# Altium footprint library PCB_Libraries.PcbLib: 49 footprints (part 1 of 4)
Each footprint in its own frame and in the unit in brackets; x right, y up, seen from the top. Pads: shape width x height; smd on the part's side, far side on the other; paste and mask are expansions set on the pad; w line width, h text height; cw(c..) or ccw(c..) is an arc to the next point about the centre after c.
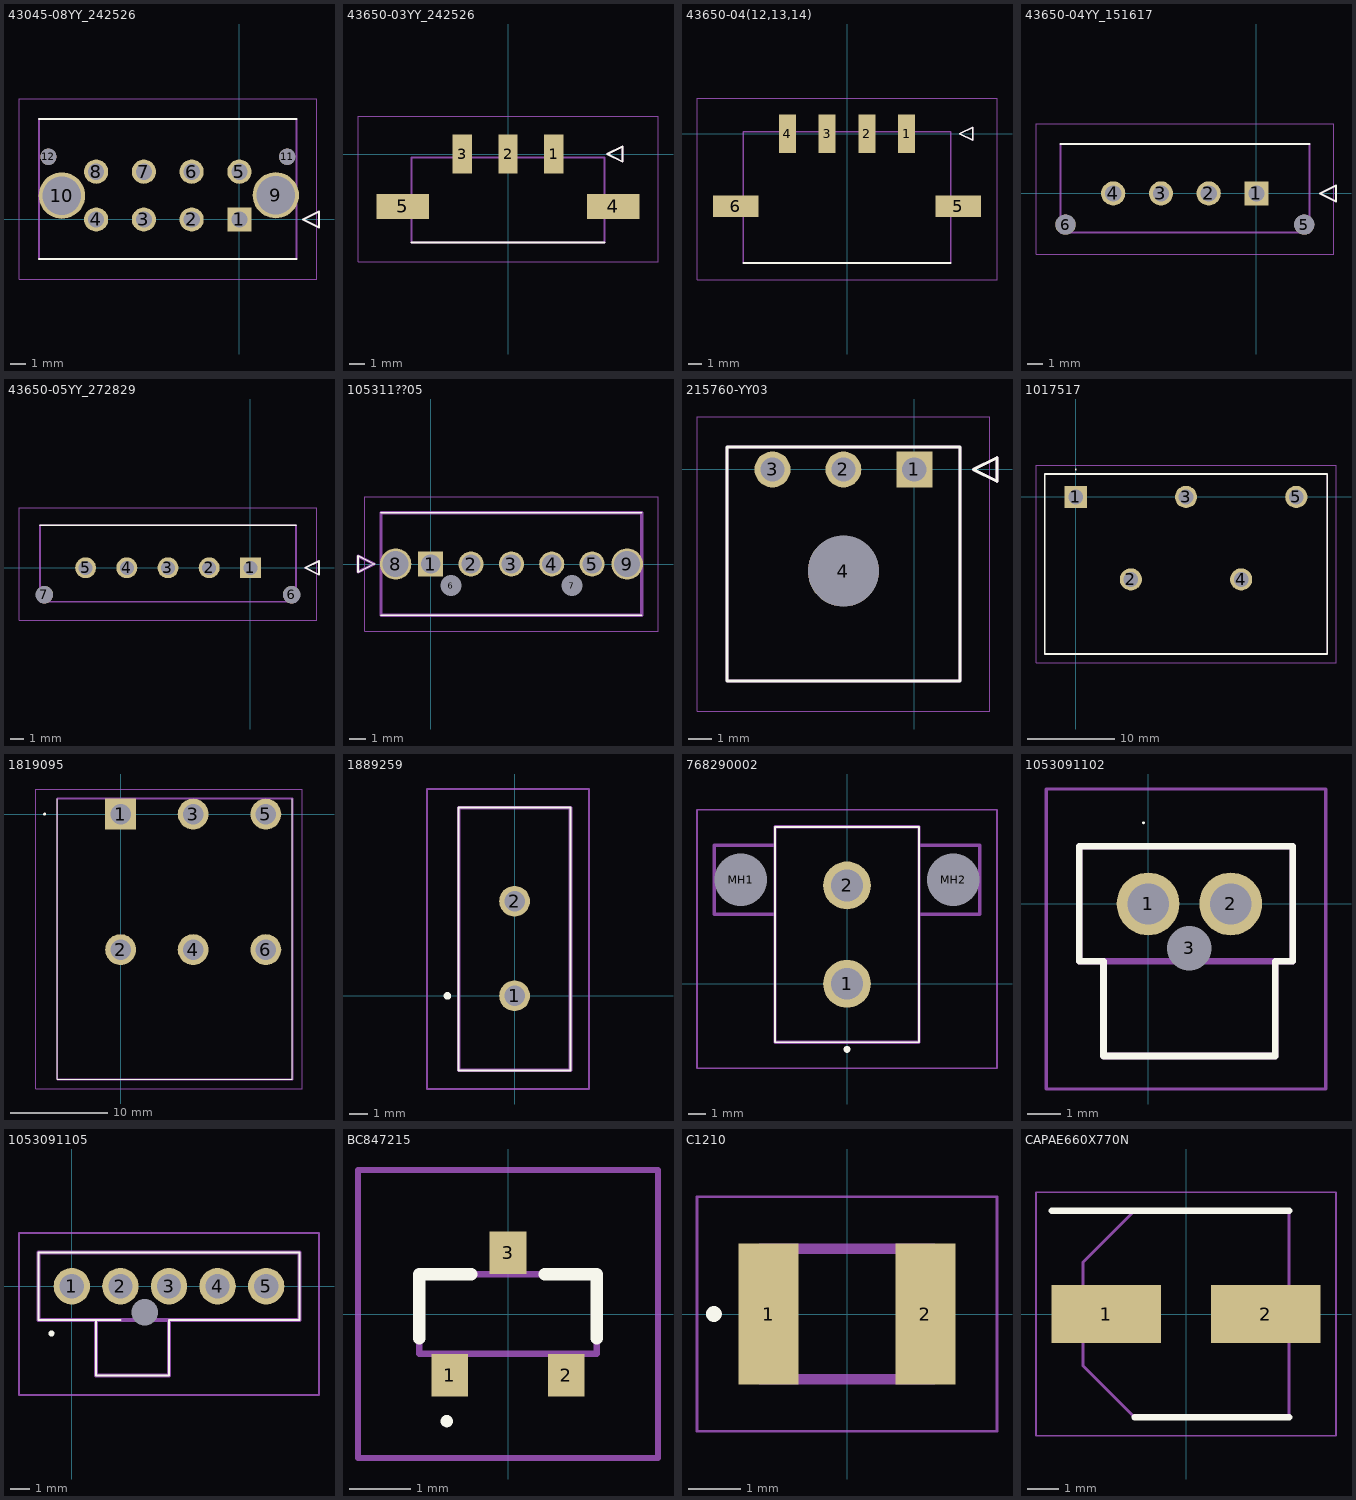
[diagram p0: the footprints below, top view; thin cyan lines are the x and y axes]

## 43045-08YY_242526 [mm]
pads (12):
  rect 1.52x1.52 hole 1.02: 1(0,0)
  round 1.52 hole 1.02: 2(-3,0) 3(-6,0) 4(-9,0) 5(0,3) 6(-3,3) 7(-6,3) 8(-9,3)
  round 2.91 hole 2.41: 9(2.286,1.524) 10(-11.15,1.5)
  round 1.02 hole 1.02 unplated: 11(3,3.94) 12(-12,3.94)
Top Overlay:
  lines w0.127: -12.575,-2.47 3.575,-2.47 ; -12.575,6.3 3.575,6.3 ; 4,0 5,0.5 5,-0.5 4,0
Mechanical 13:
  lines w0.127: -12.575,-2.47 -12.575,6.3 3.575,6.3 3.575,-2.47 -12.575,-2.47 ; 4,0 5,0.5 5,-0.5 4,0
Mechanical 15:
  lines w0.05: -13.845,-3.74 -13.845,7.57 4.845,7.57 4.845,-3.74 -13.845,-3.74
3D body "43045-0825.stp": height 9.78, standoff -3.3, extent -12.585,-2.48 3.565,6.29

## 43650-03YY_242526 [mm]
pads (5):
  rect 1.27x2.54 smd: 1(3,0) 2(0,0) 3(-3,0)
  rect 3.43x1.65 smd: 4(6.885,-3.42) 5(-6.885,-3.42)
Top Overlay:
  lines w0.127: -6.325,-5.785 6.325,-5.785 ; 6.5,0 7.5,-0.5 7.5,0.5 6.5,0
Mechanical 13:
  lines w0.127: -6.325,-5.785 6.325,-5.785 6.325,-0.215 -6.325,-0.215 -6.325,-5.785 ; 6.5,0 7.5,-0.5 7.5,0.5 6.5,0
Mechanical 15:
  lines w0.05: -9.819,-7.055 9.819,-7.055 9.819,2.489 -9.819,2.489 -9.819,-7.055
3D body "43650-0325.stp": height 9.93, standoff 0, extent -8.325,-5.85 8.325,0.718

## 43650-04(12,13,14) [mm]
pads (6):
  rect 1.27x2.92 smd: 1(4.5,0) 2(1.5,0) 3(-1.5,0) 4(-4.5,0)
  rect 3.43x1.65 smd: 5(8.385,-5.47) 6(-8.385,-5.47)
Top Overlay:
  lines w0.127: -7.825,-9.75 7.825,-9.75 ; 8.5,0 9.5,0.5 9.5,-0.5 8.5,0
Mechanical 13:
  lines w0.127: -7.825,-9.75 -7.825,0.15 7.825,0.15 7.825,-9.75 -7.825,-9.75 ; 8.5,0 9.5,0.5 9.5,-0.5 8.5,0
Mechanical 15:
  lines w0.05: -11.319,-11.02 -11.319,2.679 11.319,2.679 11.319,-11.02 -11.319,-11.02
3D body "43650-0414.stp": height 5.71, standoff 0.04, extent -9.825,-10.04 9.825,0.698

## 43650-04YY_151617 [mm]
pads (6):
  rect 1.52x1.52 hole 1.02: 1(0,0)
  round 1.52 hole 1.02: 2(-3,0) 3(-6,0) 4(-9,0)
  round 1.27 hole 1.27 unplated: 5(3,-1.96) 6(-12,-1.96)
Top Overlay:
  lines w0.127: -12.325,3.1 3.325,3.1 ; 4,0 5,0.5 5,-0.5 4,0
Mechanical 13:
  lines w0.127: -12.325,-2.47 -12.325,3.1 3.325,3.1 3.325,-2.47 -12.325,-2.47 ; 4,0 5,0.5 5,-0.5 4,0
Mechanical 15:
  lines w0.05: -13.854,-3.814 -13.854,4.37 4.854,4.37 4.854,-3.814 -13.854,-3.814
3D body "43650-0417.stp": height 9.77, standoff -3.31, extent -12.215,-2.46 3.435,3.145

## 43650-05YY_272829 [mm]
pads (7):
  rect 1.52x1.52 hole 1.02: 1(0,0)
  round 1.52 hole 1.02: 2(-3,0) 3(-6,0) 4(-9,0) 5(-12,0)
  round 1.27 hole 1.27 unplated: 6(3,-1.96) 7(-15,-1.96)
Top Overlay:
  lines w0.127: -15.325,3.1 3.325,3.1 ; 4,0 5,0.5 5,-0.5 4,0
Mechanical 13:
  lines w0.127: -15.325,-2.47 -15.325,3.1 3.325,3.1 3.325,-2.47 -15.325,-2.47 ; 4,0 5,0.5 5,-0.5 4,0
Mechanical 15:
  lines w0.05: -16.854,-3.814 -16.854,4.37 4.854,4.37 4.854,-3.814 -16.854,-3.814
3D body "43650-0528.stp": height 9.83, standoff -3.25, extent -15.26,-2.39 3.38,3.215

## 105311??05 [mm]
pads (9):
  rect 1.55x1.55 hole 1.2: 1(0,0)
  round 1.55 hole 1.2: 2(2.5,0) 3(5,0) 4(7.5,0) 5(10,0)
  round 0.65 hole 1.3 unplated: 6(1.25,-1.34) 7(8.75,-1.34)
  round 1.95 hole 1.6: 8(-2.17,0) 9(12.17,0)
Top Overlay:
  lines w0.1: -3.08,-3.17 13.08,-3.17 ; -3.08,3.17 13.08,3.17 ; -4.5,-0.5 -3.5,0 -4.5,0.5 -4.5,-0.5
Mechanical 13:
  lines w0.2: -4.5,-0.5 -3.5,0 -4.5,0.5 -4.5,-0.5 ; -3.08,-3.17 -3.08,3.17 13.08,3.17 13.08,-3.17 -3.08,-3.17
Mechanical 15:
  lines w0.05: -4.08,-4.17 -4.08,4.17 14.08,4.17 14.08,-4.17 -4.08,-4.17
3D body "1053111105.stp": height 10.6, standoff -3.11, extent -3.15,-1.66 13.01,4.68

## 215760-YY03 [mm]
pads (4):
  rect 1.52x1.52 hole 1.02: 1(0,0)
  round 1.52 hole 1.02: 2(-3,0) 3(-6,0)
  round 3 hole 3 unplated: 4(-3,-4.3)
Top Overlay:
  lines w0.127: -7.925,-8.955 -7.925,0.955 1.925,0.955 1.925,-8.955 -7.925,-8.955 ; 2.5,0 3.5,0.5 3.5,-0.5 2.5,0
Mechanical 13:
  lines w0.127: -7.925,-8.955 -7.925,0.955 1.925,0.955 1.925,-8.955 -7.925,-8.955 ; 2.5,0 3.5,0.5 3.5,-0.5 2.5,0
Mechanical 15:
  lines w0.05: -9.195,-10.225 -9.195,2.225 3.195,2.225 3.195,-10.225 -9.195,-10.225
3D body "215760-2003.stp": height 9.12, standoff 0, extent -7.735,-8.955 2.115,0.955

## 1017517 [mm]
pads (5):
  rect 2.55x2.55 hole 1.7: 1(0,0)
  round 2.55 hole 1.7: 2(6.35,-9.5) 3(12.7,0) 4(19.05,-9.5) 5(25.4,0)
Top Overlay:
  lines w0.1: 0,3.1 ccw(c0,3.15) 0,3.2 ; 0,3.1 cw(c0,3.15) 0,3.2 ; 0,3.1 0,3.2
  lines w0.2: -3.575,-18.1 28.975,-18.1 28.975,2.65 -3.575,2.65 -3.575,-18.1
Mechanical 13:
  lines w0.1: -3.575,-18.1 28.975,-18.1 28.975,2.65 -3.575,2.65 -3.575,-18.1
Mechanical 15:
  lines w0.1: -4.575,-19.1 29.975,-19.1 29.975,3.65 -4.575,3.65 -4.575,-19.1
3D body "1017517.stp": height 24.35, standoff -2.55, extent -3.58,-18.1 28.97,2.65

## 1819095 [mm]
pads (6):
  rect 3.2x3.2 hole 2.1: 1(0,0)
  round 3.2 hole 2.1: 2(0,-14) 3(7.5,0) 4(7.5,-14) 5(15,0) 6(15,-14)
Top Overlay:
  circle w0.2: c-7.85,0 r0.05
  lines w0.1: -6.55,1.6 -6.55,-27.4 17.75,-27.4 17.75,1.6
Mechanical 13:
  lines w0.2: -6.55,-27.4 -6.55,1.6 17.75,1.6 17.75,-27.4 -6.55,-27.4
Mechanical 15:
  lines w0.05: -8.75,-28.4 -8.75,2.6 18.75,2.6 18.75,-28.4 -8.75,-28.4
3D body "1819095.stp": height 33.78, standoff -4.71, extent -6.75,-27.404 17.55,1.596

## 1889259 [mm]
pads (2):
  round 1.65 hole 1.1: 1(0,0) 2(0,5.08)
Top Overlay:
  lines w0.1: -3,-4 -3,10.1 3,10.1 3,-4 -3,-4
  lines w0.2: -3.7,0 ccw(c-3.6,0) -3.5,0 ccw(c-3.6,0) -3.7,0
Mechanical 13:
  lines w0.2: -3,-4 -3,10.1 3,10.1 3,-4 -3,-4
Mechanical 15:
  lines w0.1: -4.7,-5 -4.7,11.1 4,11.1 4,-5 -4.7,-5
3D body "1889259.stp": height 13.32, standoff -2.93, extent -3.4,-4 3,10.1

## 768290002 [mm]
pads (4):
  round 2.775 hole 1.85: 1(0,0) 2(0,5.7)
  round 1.525 hole 3.05 unplated: MH1(-6.17,6.025) MH2(6.17,6.025)
Top Overlay:
  lines w0.1: -4.175,-3.39 -4.175,9.09 4.175,9.09 4.175,-3.39 -4.175,-3.39
  lines w0.2: -0.1,-3.8 ccw(c0,-3.8) 0.1,-3.8 ccw(c0,-3.8) -0.1,-3.8
Mechanical 13:
  lines w0.2: -4.175,4.025 -7.695,4.025 -7.695,8.025 -4.175,8.025 ; 4.175,4.025 7.695,4.025 7.695,8.025 4.175,8.025 ; -4.175,-3.39 -4.175,9.09 4.175,9.09 4.175,-3.39 -4.175,-3.39
Mechanical 15:
  lines w0.1: -8.695,-4.9 -8.695,10.09 8.695,10.09 8.695,-4.9 -8.695,-4.9
3D body "76829-0002.stp": height 14.67, standoff -3.91, extent -7.696,-3.214 7.696,10.82

## 1053091102 [mm]
pads (3):
  round 1.9 hole 1.25: 1(0,0) 2(2.5,0)
  round 0.675 hole 1.35 unplated: 3(1.25,-1.34)
Top Overlay:
  lines w0.044: -0.157,2.455 cw(c-0.135,2.455) -0.113,2.455 cw(c-0.135,2.455) -0.157,2.455
  lines w0.2: -2.081,-1.74 -1.35,-1.74 -1.35,-4.6 3.85,-4.6 3.85,-1.74 4.374,-1.74 4.374,1.74 -2.081,1.74 -2.081,-1.74
Mechanical 13:
  lines w0.2: -1.35,-1.74 -1.35,-4.6 3.85,-4.6 3.85,-1.74 ; -2.081,-1.74 -2.081,1.74 4.374,1.74 4.374,-1.74 -2.081,-1.74
Mechanical 15:
  lines w0.1: -3.081,-5.6 -3.081,3.477 5.374,3.477 5.374,-5.6 -3.081,-5.6
3D body "105309-1102.stp": height 10.47, standoff -3.24, extent -1.66,-4.6 4.28,1.74

## 1053091105 [mm]
pads (6):
  round 1.875 hole 1.25: 1(0,0) 2(2.5,0) 3(5,0) 4(7.5,0) 5(10,0)
  round 0.675 hole 1.35 unplated: MH1(3.75,-1.34)
Top Overlay:
  lines w0.1: 1.25,-1.74 1.25,-4.6 5,-4.6 5,-1.74 11.72,-1.74 11.72,1.74 -1.72,1.74 -1.72,-1.74 2.5,-1.74
  lines w0.2: -1.1,-2.43 ccw(c-1.05,-2.43) -1,-2.43 ccw(c-1.05,-2.43) -1.1,-2.43
Mechanical 13:
  lines w0.2: 1.25,-1.74 1.25,-4.6 5,-4.6 5,-1.74 ; -1.72,-1.74 -1.72,1.74 11.72,1.74 11.72,-1.74 -1.72,-1.74
Mechanical 15:
  lines w0.1: -2.72,-5.6 -2.72,2.74 12.72,2.74 12.72,-5.6 -2.72,-5.6
3D body "105309-1105.stp": height 10.39, standoff -3.32, extent -1.72,-4.6 11.72,1.74

## BC847215 [mm]
pads (3):
  rect 0.6x0.7 smd: 1(-0.95,-1) 2(0.95,-1) 3(0,1)
Top Overlay:
  lines w0.1: -1,-1.8 ccw(c-1,-1.75) -1,-1.7 ccw(c-1,-1.75) -1,-1.8
  lines w0.2: -1.45,-0.4 -1.45,0.65 -0.6,0.65 ; 0.6,0.65 1.45,0.65 1.45,-0.4
Mechanical 13:
  lines w0.1: -1.45,-0.65 1.45,-0.65 1.45,0.65 -1.45,0.65 -1.45,-0.65
Mechanical 15:
  lines w0.1: -2.45,-2.35 2.45,-2.35 2.45,2.35 -2.45,2.35 -2.45,-2.35
3D body "BC847,215.stp": height 0.95, standoff 0, extent -1.452,-1.201 1.448,1.199

## C1210 [mm]
pads (2):
  rect 1.15x2.7 smd: 1(-1.5,0) 2(1.5,0)
Top Overlay:
  circle w0.2: c-2.55,0 r0.05
Mechanical 13:
  lines w0.2: -1.65,-1.25 -1.65,1.25 1.65,1.25 1.65,-1.25 -1.65,-1.25
Mechanical 15:
  lines w0.05: -2.875,-2.25 -2.875,2.25 2.875,2.25 2.875,-2.25 -2.875,-2.25
3D body "C1210C104MBRACTU.stp": height 1.4, standoff 0, extent -1.7,-1.35 1.7,1.35

## CAPAE660X770N [mm]
pads (2):
  rect 3.5x1.85 smd: 1(-2.55,0) 2(2.55,0)
Top Overlay:
  lines w0.2: -4.3,3.3 3.3,3.3 ; -1.65,-3.3 3.3,-3.3
Mechanical 13:
  lines w0.1: -3.3,-1.65 -1.65,-3.3 3.3,-3.3 3.3,3.3 -1.65,3.3 -3.3,1.65 -3.3,-1.65
Mechanical 15:
  lines w0.05: -4.8,-3.9 -4.8,3.9 4.8,3.9 4.8,-3.9 -4.8,-3.9
3D body "865080845005.stp": height 7.7, standoff 0, extent -3.575,-3.4 3.575,3.4